# Altium footprint library CHIP-Library.PcbLib: 345 footprints (part 11 of 22)
Each footprint in its own frame and in the unit in brackets; x right, y up, seen from the top. Pads: shape width x height; smd on the part's side, far side on the other; paste and mask are expansions set on the pad; w line width, h text height; cw(c..) or ccw(c..) is an arc to the next point about the centre after c.
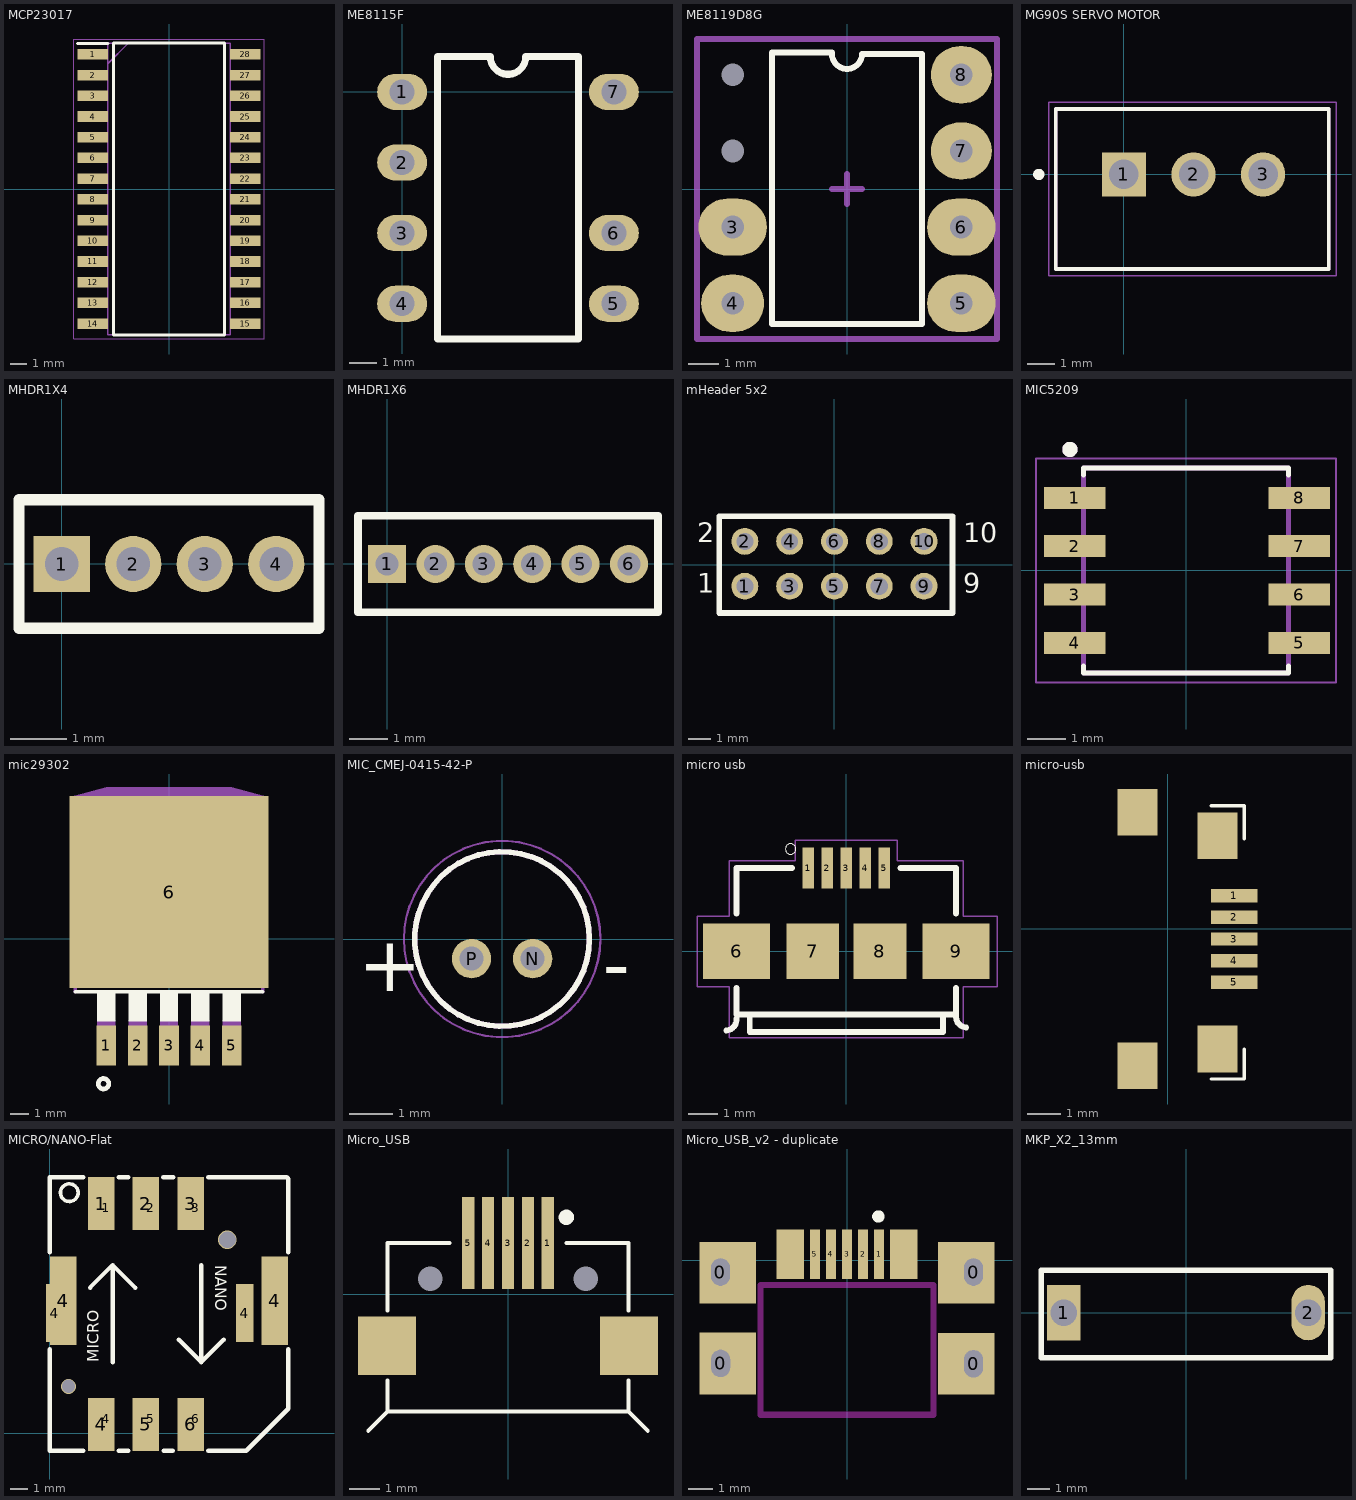
[diagram p10: the footprints below, top view; thin cyan lines are the x and y axes]

## MCP23017 [mm]
pads (28):
  rect 1.85x0.65 smd: 1(-4.675,8.255) 2(-4.675,6.985) 3(-4.675,5.715) 4(-4.675,4.445) 5(-4.675,3.175) 6(-4.675,1.905) 7(-4.675,0.635) 8(-4.675,-0.635) 9(-4.675,-1.905) 10(-4.675,-3.175) 11(-4.675,-4.445) 12(-4.675,-5.715) 13(-4.675,-6.985) 14(-4.675,-8.255) 15(4.675,-8.255) 16(4.675,-6.985) 17(4.675,-5.715) 18(4.675,-4.445) 19(4.675,-3.175) 20(4.675,-1.905) 21(4.675,-0.635) 22(4.675,0.635) 23(4.675,1.905) 24(4.675,3.175) 25(4.675,4.445) 26(4.675,5.715) 27(4.675,6.985) 28(4.675,8.255)
Top Overlay:
  lines w0.2: -5.6,8.93 -3.75,8.93 ; -3.4,-8.95 -3.4,8.95 3.4,8.95 3.4,-8.95 -3.4,-8.95
Mechanical 13:
  lines w0.1: -3.75,7.68 -2.48,8.95 ; -3.75,-8.95 -3.75,8.95 3.75,8.95 3.75,-8.95 -3.75,-8.95
Mechanical 15:
  lines w0.05: -5.85,-9.2 -5.85,9.2 5.85,9.2 5.85,-9.2 -5.85,-9.2
3D body "MCP23017T-E_SO.stp": height 2.65, standoff 0, extent -5.15,-8.95 5.15,8.95

## ME8115F [mm]
height 1.91
pads (7):
  oval 1.8x1.3 hole 0.9: 1(0,0) 2(0,-2.54) 3(0,-5.08) 4(0,-7.62) 5(7.62,-7.62) 6(7.62,-5.08) 7(7.62,0)
Top Overlay:
  lines w0.254: 1.27,-8.89 1.27,1.27 3.175,1.27 ccw(c3.81,1.27) 4.445,1.27 6.35,1.27 6.35,-8.89 1.27,-8.89
3D body "User Library-DIP-7.step": height 4.33, standoff -3.61, extent -1.172,-8.535 8.793,0.915

## ME8119D8G [mil] "DIP8"
height 1300
pads (8):
  round 0 hole 30 paste-99999 mask+0: 1(-150,150) 2(-150,50)
  oval 90x75 hole 30 paste-99999 mask+0: 3(-150,-50) 5(150,-150) 6(150,-50)
  oval 82.68x75 hole 30 paste-99999 mask+0: 4(-150,-150)
  oval 80x75 hole 30 paste-99999 mask+0: 7(150,50) 8(150,150)
Top Overlay:
  lines w7.87: -19.68,177.17 ccw(c0,177.17) 19.68,177.17 29.53,177.17 98.43,177.17 98.43,-177.17 -98.43,-177.17 -98.43,179.13 -19.68,179.13
Mechanical 15:
  lines w7.87: -19.68,0 19.69,0 ; 0,-19.68 0,19.69 0,0 ; -196.85,-196.85 196.85,-196.85 196.85,187.01 196.85,196.85 177.17,196.85 -196.85,196.85 -196.85,-196.85
3D body "DIP-8-9.stp": height 189.37, standoff -127.95, extent -180.14,-181.1 180.14,181.1

## MG90S SERVO MOTOR [mm]
pads (3):
  rect 1.59x1.59 hole 1.06: 1(0,0)
  round 1.59 hole 1.06: 2(2.5,0) 3(5,0)
Top Overlay:
  circle w0.2: c-3.06,0 r0.1
  lines w0.127: -2.45,-3.4 7.366,-3.4 7.366,2.35 -2.45,2.35 -2.45,-3.4
Mechanical 13:
  lines w0.127: -2.45,-3.4 7.366,-3.4 7.366,2.35 -2.45,2.35 -2.45,-3.4
Mechanical 15:
  lines w0.05: -2.7,-3.65 7.62,-3.65 7.62,2.6 -2.7,2.6 -2.7,-3.65
3D body "User Library-B3B-XH.STEP": height 7, standoff -3.4, extent -2.517,-3.4 7.383,2.35
3D body "User Library-Servo_Tower_Pro_MG90S.step": height 31.5, standoff 0, extent -3.048,12.652 9.552,44.752

## MHDR1X4 [mm] "Connector; Header; 4 Position"
pads (4):
  rect 1x1 hole 0.6: 1(0,0)
  round 1 hole 0.6: 2(1.27,0) 3(2.54,0) 4(3.81,0)
Top Overlay:
  lines w0.2: -0.762,-1.143 -0.762,1.143 4.572,1.143 4.572,-1.143 -0.762,-1.143
3D body "User Library-PIN-Header-1_27_1x2.step": height 4.85, standoff -2.4, extent 1.905,-1.2 4.445,1.2
3D body "User Library-PIN-Header-1_27_1x2.step": height 4.85, standoff -2.4, extent -0.635,-1.2 1.905,1.2

## MHDR1X6 [mm] "Connector; Header; 6 Position"
pads (6):
  rect 1x1 hole 0.6: 1(0,0)
  round 1 hole 0.6: 2(1.27,0) 3(2.54,0) 4(3.81,0) 5(5.08,0) 6(6.35,0)
Top Overlay:
  lines w0.2: -0.762,-1.27 7.112,-1.27 7.112,1.27 -0.762,1.27 -0.762,-1.27
3D body "User Library-PIN-Header-1_27_1x2.step": height 4.85, standoff -2.4, extent 4.445,-1.2 6.985,1.2
3D body "User Library-PIN-Header-1_27_1x2.step": height 4.85, standoff -2.4, extent 1.905,-1.2 4.445,1.2
3D body "User Library-PIN-Header-1_27_1x2.step": height 4.85, standoff -2.4, extent -0.635,-1.2 1.905,1.2

## mHeader 5x2 [mm] "2mm pitch"
pads (10):
  round 1.2 hole 0.762: 1(-3.988,-0.965) 2(-3.988,1.035) 3(-1.988,-0.965) 4(-1.988,1.035) 5(0.012,-0.965) 6(0.012,1.035) 7(2.012,-0.965) 8(2.012,1.035) 9(4.012,-0.965) 10(4.012,1.035)
Top Overlay:
  lines w0.254: -5.131,-2.159 -5.131,1.727 -5.131,2.159 5.283,2.159 5.283,-2.159 -5.131,-2.159
  text "1" at -6.121,-1.549 h1.5
  text "2" at -6.121,0.711 h1.5
  text "9" at 5.766,-1.549 h1.5
  text "10" at 5.766,0.711 h1.5

## MIC5209 [mm]
pads (8):
  rect 1.61x0.58 smd: 1(-2.921,1.905) 2(-2.921,0.635) 3(-2.921,-0.635) 4(-2.921,-1.905) 5(2.97,-1.905) 6(2.97,-0.635) 7(2.97,0.635) 8(2.97,1.905)
Top Overlay:
  circle w0.2: c-3.048,3.175 r0.1
  lines w0.127: -2.69,-2.51 -2.69,-2.69 2.69,-2.69 2.69,-2.51 ; -2.69,2.5 -2.69,2.69 2.69,2.69 2.69,2.5
Mechanical 4:
  circle w0.2: c-3.048,3.175 r0.1
  circle w0.2: c-3.048,3.175 r0.1
  lines w0.127: -2.69,-2.69 2.69,-2.69 ; -2.69,-2.69 -2.69,2.69 ; -2.69,-2.69 2.69,-2.69 ; -2.69,-2.69 -2.69,2.69 ; -2.69,2.69 2.69,2.69 ; -2.69,2.69 2.69,2.69 ; 2.69,-2.69 2.69,2.69 ; 2.69,-2.69 2.69,2.69
Mechanical 16:
  lines w0.05: -3.937,-2.94 3.937,-2.94 3.937,2.94 -3.937,2.94 -3.937,-2.94
3D body "User Library-so8-3.STEP": height 1.7, standoff 0, extent -3,-2.45 3,2.45

## mic29302 [mil]
pads (6):
  rect 42x85 smd: 1(-134,-228) 2(-67,-228) 3(0,-228) 4(67,-228) 5(134,-228)
  rect 425.2x409.84 smd: 6(0,100)
Top Overlay:
  circle w10: c-140,-310 r11.18
  region: -153.22,-110 -115,-110 -115,-176.25 -153.22,-176.25
  region: -86.06,-110 -48,-110 -48,-176.13 -86.06,-176.13
  region: -19,-110 19,-110 19,-176.02 -19,-176.02
  region: 48.08,-110 86,-110 86,-176.3 48.08,-176.3
  region: 115.19,-110 153,-110 153,-176.3 115.19,-176.3
  lines w8: -200.55,-113.39 200.55,-113.39
Mechanical 4:
  region: -153.12,-175 -115,-175 -115,-260.2 -153.12,-260.2
  region: -86.1,-175 -48,-175 -48,-260.31 -86.1,-260.31
  region: -19.03,-175 19,-175 19,-260.36 -19.03,-260.36
  region: 48.01,-175 86,-175 86,-260.07 48.01,-260.07
  region: 115.23,-175 153,-175 153,-260.51 115.23,-260.51
  region: -201,286.1 -201,302.29 -133,320.29 133,320.29 201,302.29 201,286.1
  region: -153.12,-175 -115,-175 -115,-260.2 -153.12,-260.2
  region: -86.1,-175 -48,-175 -48,-260.31 -86.1,-260.31
  region: -19.03,-175 19,-175 19,-260.36 -19.03,-260.36
  region: 48.01,-175 86,-175 86,-260.07 48.01,-260.07
  region: 115.23,-175 153,-175 153,-260.51 115.23,-260.51
  region: -201,286.1 -201,302.29 -133,320.29 133,320.29 201,302.29 201,286.1
  lines w8: -200.98,286.1 -200.98,302.28 ; -200.98,286.1 200.98,286.1 ; -200.98,286.1 -200.98,302.28 ; -200.98,286.1 200.98,286.1 ; -200.98,302.28 -132.99,320.28 ; -200.98,302.28 -132.99,320.28 ; -200.55,282.09 -200.55,-113.39 -200.55,282.09 ; -200.55,282.09 200.55,282.09 ; -200.55,282.09 200.55,282.09 ; -132.99,320.28 132.99,320.28 ; -132.99,320.28 132.99,320.28 ; 132.99,320.28 200.98,302.28 ; 132.99,320.28 200.98,302.28 ; 200.55,282.09 200.55,-113.39 200.55,282.09 ; 200.98,286.1 200.98,302.28 ; 200.98,286.1 200.98,302.28
3D body "User Library-TO-263 5Ld.step": height 179.92, standoff -0.39, extent -199.45,-268.21 200.55,308.21

## MIC_CMEJ-0415-42-P [mm]
pads (2):
  round 0.9 hole 0.55: N(0.7,-0.45) P(-0.7,-0.45)
Top Overlay:
  circle w0.127: c0,0 r2
  text "+" at -3.3,-1.2 h1.27
  text "-" at 2.3,-1.2 h1.27
Mechanical 13:
  circle w0.127: c0,0 r2
  text "+" at -3.3,-1.2 h1.27
  text "-" at 2.3,-1.2 h1.27
Mechanical 15:
  circle w0.05: c0,0 r2.25
3D body "CUI_DEVICES_CMC-4015-40P.step": height 0.9, standoff -2.4, extent -2,-2 2,2

## micro usb [mm]
pads (9):
  rect 0.4x1.4 smd: 1(-1.3,2.85) 2(-0.65,2.85) 3(0,2.85) 4(0.65,2.85) 5(1.3,2.85)
  rect 2.3x1.9 smd: 6(-3.75,0) 9(3.75,0)
  rect 1.8x1.9 smd: 7(-1.15,0) 8(1.15,0)
Top Overlay:
  circle w0: c-1.9,3.5 r0.18
  lines w0.2: -4.099,-2.7 ccw(c-4.125,-2.325) -3.75,-2.299 ; -3.75,-1.25 -3.75,-2.15 3.75,-2.15 3.75,-1.25 ; -3.75,1.3 -3.75,2.85 -1.85,2.85 ; -3.3,-2.2 -3.3,-2.75 3.3,-2.75 3.3,-2.2 ; 1.85,2.85 3.75,2.85 3.75,1.3 ; 3.75,-2.199 ccw(c4.125,-2.225) 4.099,-2.6
Mechanical 15:
  lines w0.05: -5.1,-1.2 -5.1,1.2 -4,1.2 -4,3.1 -1.75,3.1 -1.75,3.8 1.75,3.8 1.75,3.1 4,3.1 4,1.2 5.15,1.2 5.15,-1.2 4,-1.2 4,-2.95 -4,-2.95 -4,-1.2 -5.1,-1.2
3D body "47346-0001.stp": height 2.71, standoff -0.23, extent -3.99,-2.653 3.99,2.777

## micro-usb [mm]
pads (9):
  rect 1.4x0.4 smd: 1(1.994,0.995) 2(1.994,0.345) 3(1.994,-0.305) 4(1.994,-0.955) 5(1.994,-1.605)
  rect 1.2x1.4 smd: ""(-0.906,-4.105) ""(-0.906,3.495) ""(1.494,-3.605) ""(1.494,2.795)
Top Overlay:
  lines w0.1: 1.294,-4.505 2.294,-4.505 2.294,-3.605 ; 1.294,3.695 2.294,3.695 2.294,3.495 2.294,2.695 ; 2.294,-4.005 2.294,-3.905
3D body "usb_mc_2_b_smd.stp": height 2.69, standoff -0.59, extent -3.556,-4.265 2.044,3.735

## MICRO/NANO-Flat [mm]
pads (16):
  rect 1.5x3 smd: 1(2.9,13) 2(5.44,13) 3(7.98,13) 4(2.9,0.5) 5(5.44,0.5) 6(7.98,0.5)
  rect 0.9x1 smd: 1(3.18,12.775) 2(5.72,12.775) 3(8.26,12.775) 4(3.18,0.825) 5(5.72,0.825) 6(8.26,0.825)
  rect 1x3.29 smd: 4(0.28,6.805) 4(11.05,6.805)
  rect 1.5x5 smd: 4(0.75,7.5) 4(12.75,7.5)
via 10.06,10.955 diameter 1.05 hole 0.95
via 1.06,2.655 diameter 0.85 hole 0.75
Top Overlay:
  circle w0.2: c1.1,13.625 r0.5
  lines w0.254: 0,4.75 0,-1 1.9,-1 ; 0,10.25 0,14.5 1.9,14.5 ; 2.275,8.25 3.55,9.525 ; 3.55,4.025 3.55,9.525 ; 3.9,-1 4.45,-1 ; 3.9,14.5 4.45,14.5 ; 4.825,8.25 3.55,9.525 ; 6.425,14.5 7,14.5 ; 6.45,-1 6.975,-1 ; 7.3,5.3 8.575,4.025 ; 8.575,9.525 8.575,4.025 ; 8.975,-1 11.125,-1 13.5,1.375 13.5,4.75 ; 8.975,14.5 13.425,14.5 13.5,14.425 13.5,10.25 ; 9.85,5.3 8.575,4.025
  text "MICRO" at 3,4.025 h1.1
  text "NANO" at 9.15,9.525 h1.1
3D body "1042240820.stp": height 1.03, standoff -0.08, extent 1.6,0.55 11.95,13.1

## Micro_USB [mm]
height 4.32
pads (9):
  rect 0.4x3 smd: 1(1.3,1.679) 2(0.65,1.679) 3(0,1.679) 4(-0.65,1.679) 5(-1.3,1.679)
  round 0 hole 0.8 unplated: MH1(2.54,0.508) MH2(-2.54,0.508)
  rect 1.9x1.9 smd: ""(-3.95,-1.679) ""(3.95,-1.679)
Top Overlay:
  circle w0.25: c1.905,2.519 r0.125
  lines w0.127: -4.567,-4.459 -3.937,-3.829 -3.937,-2.813 ; -3.937,-0.527 -3.937,1.679 ; -3.9,-3.829 3.9,-3.829 ; -3.9,1.679 -1.905,1.679 ; 1.905,1.679 3.9,1.679 ; 3.937,-2.813 3.937,-3.829 4.567,-4.459 ; 3.937,-0.527 3.937,1.679

## Micro_USB_v2 - duplicate [mm]
height 1.05
pads (15):
  round 1.524 hole 0.762 slot 1.1 at 90 deg: 0(-5.125,-0.475) 0(-5.12,-4.175) 0(5.125,-4.191) 0(5.125,-0.475)
  rect 0.4x2 smd: 1(1.3,0.254) 2(0.65,0.254) 3(0,0.254) 4(-0.65,0.254) 5(-1.3,0.254)
  rect 2.3x2.5 smd: ""(-4.826,-4.175) ""(-4.826,-0.508) ""(4.826,-4.191) ""(4.826,-0.508)
  rect 1.1x2 smd: ""(-2.3,0.254) ""(2.3,0.254)
Top Overlay:
  circle w0.25: c1.272,1.778 r0.125
Keep-Out Layer:
  lines w0.254: -3.5,-6.25 -3.5,-1 ; -3.45,-6.25 3.5,-6.25 3.5,-1 ; -3.45,-1 3.45,-1
  lines w0.6: -5.125,-0.635 -5.125,-0.262 ; -5.12,-4.335 -5.12,-3.962 ; 5.125,-4.445 5.125,-3.962 ; 5.125,-0.762 5.125,-0.262

## MKP_X2_13mm [mm] "13mm"
pads (2):
  rect 1.5x2.5 hole 1.2: 1(-5.5,0)
  oval 1.5x2.5 hole 1.2: 2(5.5,0)
Top Overlay:
  lines w0.254: -6.516,-2.032 -6.516,1.905 ; -6.5,-2.032 6.5,-2.032 ; -6.5,1.905 6.5,1.905 ; 6.509,-2.032 6.509,1.905
3D body "User Library-X2.step": height 9, standoff -3, extent -6.627,-2 6.373,2